# EAGLE library part PINHD-2X7 (library HansPinhead)
PIN HEADER
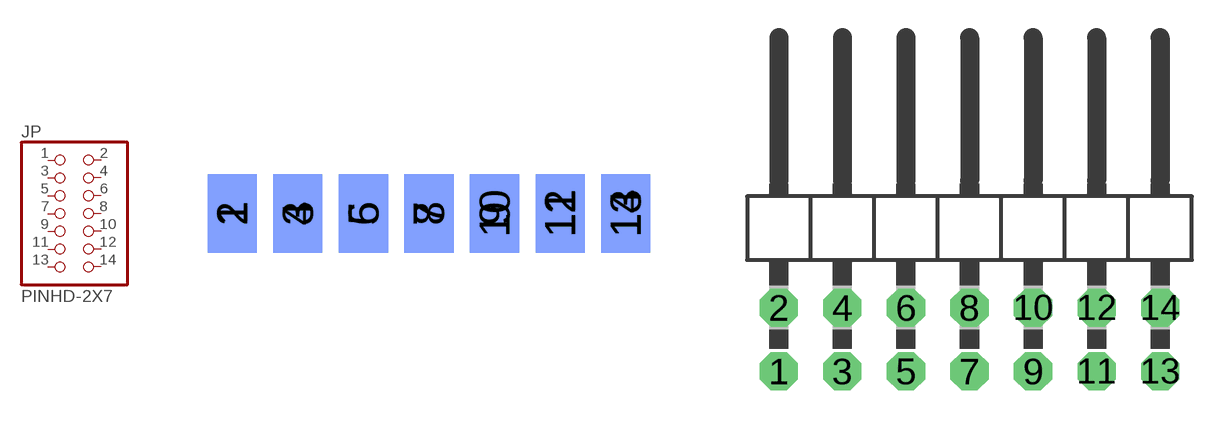
[diagram p32: symbol with the pads of 2X07; footprints 2X07, 2X07/90]

Designator prefix JP

## PINHD-2X7  [2X07]
1  1  pas
2  2  pas
3  3  pas
4  4  pas
5  5  pas
6  6  pas
7  7  pas
8  8  pas
9  9  pas
10  10  pas
11  11  pas
12  12  pas
13  13  pas
14  14  pas

## PINHD-2X7/90  [2X07/90]
Pads as for 2X07

## Footprint 2X07 (pad centres in mm)
PIN HEADER
smd 1.905 x 3.048: 1 -7.62,-1.524; 3 -5.08,-1.524; 5 -2.54,-1.524; 7 0,-1.524; 9 2.54,-1.524; 11 5.08,-1.524; 13 7.62,-1.524
smd 1.905 x 3.048 bottom: 2 -7.62,-1.524; 4 -5.08,-1.524; 6 -2.54,-1.524; 8 0,-1.524; 10 2.54,-1.524; 12 5.08,-1.524; 14 7.62,-1.524

## Footprint 2X07/90 (pad centres in mm)
PIN HEADER
drill 1.016 octagon: 1 -7.62,-6.35; 2 -7.62,-3.81; 3 -5.08,-6.35; 4 -5.08,-3.81; 5 -2.54,-6.35; 6 -2.54,-3.81; 7 0,-6.35; 8 0,-3.81; 9 2.54,-6.35; 10 2.54,-3.81; 11 5.08,-6.35; 12 5.08,-3.81; 13 7.62,-6.35; 14 7.62,-3.81